# Altium integrated library a4402-ELE-CAD.IntLib: 46 symbols (part 2 of 2)
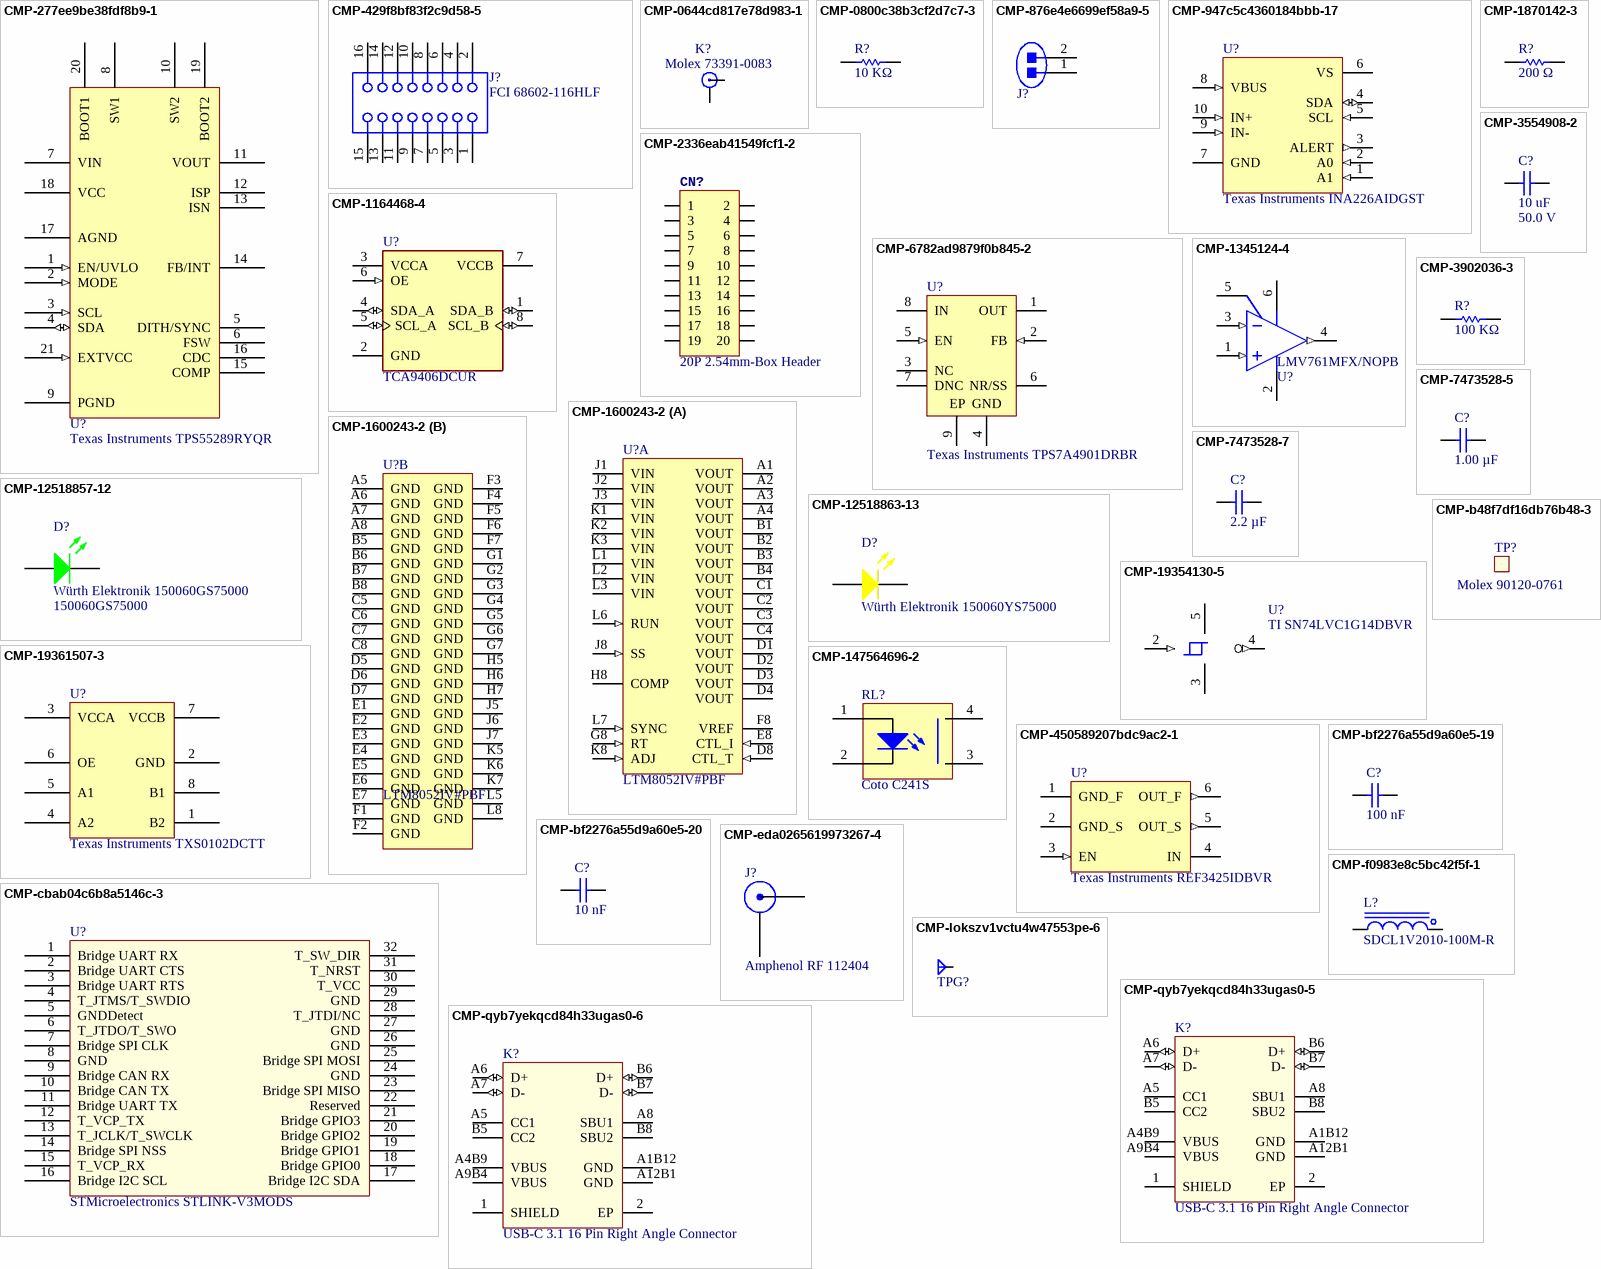
[diagram p2: symbols CMP-277ee9be38fdf8b9-1 to CMP-qyb7yekqcd84h33ugas0-6]

## CMP-cbab04c6b8a5146c-3
designator U?, comment STMicroelectronics STLINK-V3MODS
STLINK-V3 Modular In-Circuit Debugger and Programmer for STM32 Microcontrollers; Octopart Url: https://octopart.com/stlink-v3mods-stmicroelectronics-107435624; Manufacturer Part Number: STLINK-V3MODS; Lifecycle Status: Not Listed by Manufacturer; OctopartID: cbab04c6b8a5146c
footprint STMicroelectronics STLINK-V3MODS-Footprint-1
pins: 1 Bridge UART RX, 2 Bridge UART CTS, 3 Bridge UART RTS, 4 T_JTMS/T_SWDIO, 5 GNDDetect, 6 T_JTDO/T_SWO, 7 Bridge SPI CLK, 8 GND, 9 Bridge CAN RX, 10 Bridge CAN TX, 11 Bridge UART TX, 12 T_VCP_TX, 13 T_JCLK/T_SWCLK, 14 Bridge SPI NSS, 15 T_VCP_RX, 16 Bridge I2C SCL, 17 Bridge I2C SDA, 18 Bridge GPIO0, 19 Bridge GPIO1, 20 Bridge GPIO2, 21 Bridge GPIO3, 22 Reserved, 23 Bridge SPI MISO, 24 GND, 25 Bridge SPI MOSI, 26 GND, 27 GND, 28 T_JTDI/NC, 29 GND, 30 T_VCC, 31 T_NRST, 32 T_SW_DIR

## CMP-eda0265619973267-4
designator J?, comment Amphenol RF 112404
connector, rf coaxial, bnc str pcb mt recept jack, 4 legs, length .717 inch, 50 ohm; Manufacturer Part Number: 112404; Lead-Free Status: Lead Free; Gender: Male; Frequency: 4.00 GHz (max); Dielectric Material: Teflon; Footprint: PCB-bfdufqe5asedaz2dexug-1; OctopartID: eda0265619973267; ComponentLink1URL: https://grabcad.com/library/amphenol-rf-4-ghz-bnc-coaxial-bulkhead-vertical-pcb-connector-1; Contact Material: Phosphor Bronze; Mounting Style: Through Hole; Contact Plating: Gold; Octopart URL: https://octopart.com/112404-amphenol+rf-50123089; ComponentLink1Description: STEP model; RoHS: Compliant
footprint PCB-bfdufqe5asedaz2dexug-1
footprint Amphenol RF 112404-Footprint-1
pins: 1, 2

## CMP-f0983e8c5bc42f5f-1
designator L?, comment SDCL1V2010-100M-R
Inductor Power Semi-Shielded 10uH 20% 100KHz Ferrite 0.5A T/R; Octopart Url: https://octopart.com/sdcl1v2010-100m-r-cooper+bussmann-119443002; Manufacturer Part Number: SDCL1V2010-100M-R; OctopartID: f0983e8c5bc42f5f
footprint PCB-3ir64hapazioc2jy0mm2-1 (CAPC1608X90X35NL15T15)
pins: 1, 2

## CMP-lokszv1vctu4w47553pe-6
designator TPG?, comment Test Point Pad  (value not drawn)
Test Point
footprint PCB-w5299rxaittb4m04ntfs-1 (Footprint - Test Point Pad)
pins: 1 A

## CMP-qyb7yekqcd84h33ugas0-5
designator K?, comment USB-C 3.1 16 Pin Right Angle Connector
Manufacturer Part Number: USB4105-GF-A-120; CustomComponentID: qyb7yekqcd84h33ugas0; Footprint: PCB-ld6ppm2v3fcnldhcn63r-1
footprint PCB-ld6ppm2v3fcnldhcn63r-1 (Footprint - USB-C 3.1 16 Pin Right Angle Connector)
pins: 1 SHIELD, 2 EP, A1B12 GND (power), A4B9 VBUS (power), A5 CC1, A6 D+ (io), A7 D- (io), A8 SBU1, A9B4 VBUS (power), A12B1 GND (power), B5 CC2, B6 D+ (io), B7 D- (io), B8 SBU2

## CMP-qyb7yekqcd84h33ugas0-6
designator K?, comment USB-C 3.1 16 Pin Right Angle Connector
Manufacturer Part Number: USB4105-GF-A-120; CustomComponentID: qyb7yekqcd84h33ugas0; ReplaceComponentId: NMLHXIMK; Footprint: PCB-ld6ppm2v3fcnldhcn63r-1; PartId: 1
footprint PCB-ld6ppm2v3fcnldhcn63r-1
pins: 1 SHIELD, 2 EP, A1B12 GND (power), A4B9 VBUS (power), A5 CC1, A6 D+ (io), A7 D- (io), A8 SBU1, A9B4 VBUS (power), A12B1 GND (power), B5 CC2, B6 D+ (io), B7 D- (io), B8 SBU2